# Altium integrated library Transformers.IntLib: 24 symbols (part 1 of 2)
Pins are listed as number, name and electrical type; pins without a type are passive.

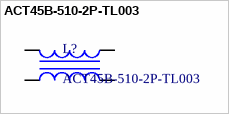
[diagram p0: symbol ACT45B-510-2P-TL003]

## ACT45B-510-2P-TL003
designator L?
Common-Mode Choke for CAN Bus System, 51uH, 50 V DC, -40 to 150 degC, 4-Pin SMD, RoHS, Tape and Reel
footprint TDK-ACT45B-510-2P-TL003-4_V (SMD, 4-Leads, Body 4.7x3.4mm, Pitch 2.5mm)
pins: 1, 2, 3, 4


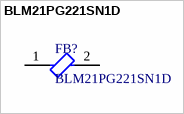
[diagram p1: symbol BLM21PG221SN1D]

## BLM21PG221SN1D
designator FB?
Chip Ferrite Bead, 0805, 220Ω @ 100MHz, 0.045Ω, 25%, 2A
footprint FP-BLM21-0_2-t0_85-e0_5-IPC_A
footprint FP-BLM21-0_2-t0_85-e0_5-IPC_B
footprint FP-BLM21-0_2-t0_85-e0_5-IPC_C
footprint FP-BLM21-0_2-t0_85-e0_5-MFG
pins: 1, 2


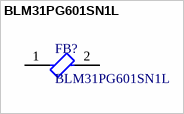
[diagram p2: symbol BLM31PG601SN1L]

## BLM31PG601SN1L
designator FB?
Chip Ferrite Bead Array, 1206, 600Ω @ 100MHz, 0.08Ω, 25%, 1.5A
footprint FP-BLM31-0_2-t1_1-IPC_A
footprint FP-BLM31-0_2-t1_1-IPC_B
footprint FP-BLM31-0_2-t1_1-IPC_C
footprint FP-BLM31-0_2-t1_1-MFG
pins: 1, 2


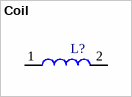
[diagram p3: symbol Coil]

## Coil
designator L?
footprint Coil_drosel
footprint 30A_10uH
footprint NR4030
footprint Coil_4.5x4.5_mm
footprint Coil-12x7x5(vert)
footprint Coil-12x7x5
pins: 1, 2


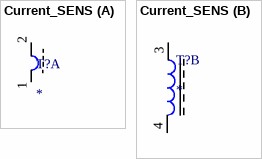
[diagram p4: symbol Current_SENS]

## Current_SENS
designator T?
footprint Current_SENS
footprint Current_Sense_13x7x5
footprint CURRENT_SENS_Case
part A pins: 1 3, 2 4
part B pins: 3, 4


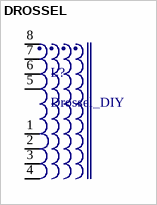
[diagram p5: symbol DROSSEL]

## DROSSEL
designator L?, comment Drossel_DIY
Drosel; PartNumber: 750311457; Manufacturer: Wuerth Elektronik; Ui: 36V; ComponentLink1Description: Manufacturer URL; ComponentLink2Description: Datasheet; ComponentLink1URL: http://www.we-online.com; PackageReference: EP13; ComponentLink2URL: http://katalog.we-online.de/pbs/datasheet/750311457.pdf
footprint Drossel
pins: 1, 2, 3, 4, 5, 6, 7, 8


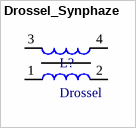
[diagram p6: symbol Drossel_Synphaze]

## Drossel_Synphaze
designator L?, comment Drossel
footprint Drossel_Synphaze
footprint T47x27x15
pins: 1, 2, 3, 4


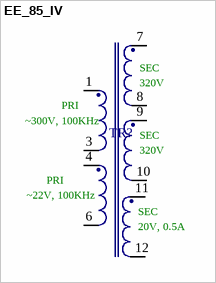
[diagram p7: symbol EE_85_IV]

## EE_85_IV
designator TR?, comment EE85  (value not drawn)
footprint EE85_Ferrite_Core
pins: 1, 3, 4, 6, 7, 8, 9, 10, 11, 12
text: SEC; 320V; PRI; ~300V, 100KHz; ~22V, 100KHz; 20V, 0.5A


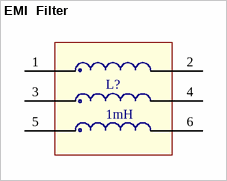
[diagram p8: symbol EMI  Filter]

## EMI  Filter
designator L?, comment 1mH
Three-Phase EMI Common Mode Filter Inductor 1mh-5mh
footprint 3PH_filter inductor 2mH 60A (High-current EMI EMC nanocrystalline amorphous three-phase common mode filter inductor 2mH 60A horizontal base plate)
pins: 1 0, 2 0, 3 0, 4 0, 5 0, 6 0


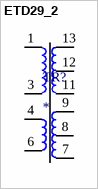
[diagram p9: symbol ETD29_2]

## ETD29_2
designator TR?
footprint TRANS_ETD_29
footprint ETD29_Transformer
footprint ETD29_Transformer_2
pins: 1, 3, 4, 6, 7, 8, 9, 11, 12, 13


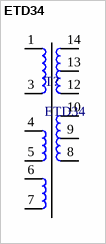
[diagram p10: symbol ETD34]

## ETD34
designator T?
footprint Transformer_ETD34
pins: 1, 3, 4, 5, 6, 7, 8, 9, 10, 12, 13, 14


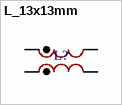
[diagram p11: symbol L_13x13mm]

## L_13x13mm
designator L?
footprint L_13x13mm
pins: 1, 2, 3, 4


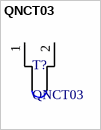
[diagram p12: symbol QNCT03]

## QNCT03
designator T?
High Precision Current Transformer QNCT03L  100A 25mA  4000:1
footprint QNCT03L (Current Transformer QNCT03L)
pins: 1 3, 2 4


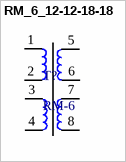
[diagram p13: symbol RM_6_12-12-18-18]

## RM_6_12-12-18-18
designator T?, comment RM-6
footprint TRANS_RM6
pins: 1, 2, 3, 4, 5, 6, 7, 8


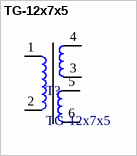
[diagram p14: symbol TG-12x7x5]

## TG-12x7x5
designator T?
footprint TG_12x7x5
pins: 1, 2, 3, 4, 5, 6


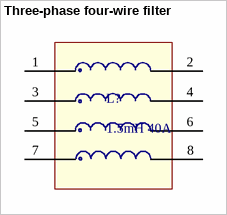
[diagram p15: symbol Three-phase four-wire filter]

## Three-phase four-wire filter
designator L?, comment 1.5mH 40A
Three-phase four-wire common mode inductor, high-power ferrite choke 1.5mH 40A, four-phase filter choke
footprint high-power ferrite choke 1.5mH 40A (Three-phase four-wire common mode inductor, high-power ferrite choke 1.5mH 40A, four-phase filter choke)
pins: 1 0, 2 0, 3 0, 4 0, 5 0, 6 0, 7 0, 8 0


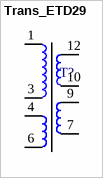
[diagram p16: symbol Trans_ETD29]

## Trans_ETD29
designator T?, comment ETD29  (value not drawn)
footprint TRANS_ETD_29
footprint ETD29_Transformer_2
pins: 1, 3, 4, 6, 7, 9, 10, 12


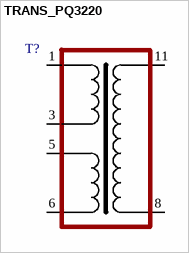
[diagram p17: symbol TRANS_PQ3220]

## TRANS_PQ3220
designator T?
footprint TRANS_PQ3220
pins: 1, 3, 5, 6, 8, 11


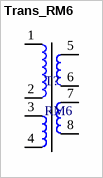
[diagram p18: symbol Trans_RM6]

## Trans_RM6
designator T?, comment RM6
footprint TRANS_RM6
pins: 1, 2, 3, 4, 5, 6, 7, 8


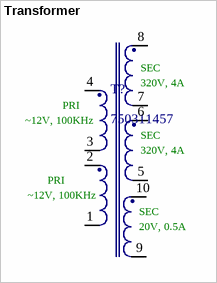
[diagram p19: symbol Transformer]

## Transformer
designator T?, comment 750311457
Transformer; Manufacturer: Wuerth Elektronik; Ui: 36V; ComponentLink1Description: Manufacturer URL; ComponentLink2Description: Datasheet; ComponentLink1URL: http://www.we-online.com; PartNumber: 750311457; PackageReference: EP13; ComponentLink2URL: http://katalog.we-online.de/pbs/datasheet/750311457.pdf
footprint Transformer
footprint EE85_Ferrite_Core
pins: 1, 2, 3, 4, 5, 6, 7, 8, 9, 10
text: SEC; 320V, 4A; PRI; ~12V, 100KHz; 20V, 0.5A


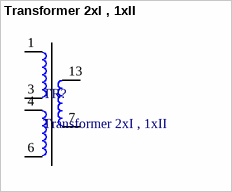
[diagram p20: symbol Transformer 2xI , 1xII]

## Transformer 2xI , 1xII
designator TR?
footprint TRANS_ETD_29
pins: 1, 3, 4, 6, 7, 13


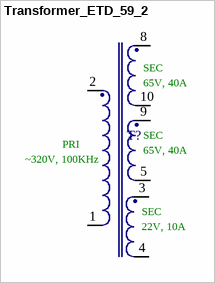
[diagram p21: symbol Transformer_ETD_59_2]

## Transformer_ETD_59_2
designator T?, comment ETD-59_2  (value not drawn)
footprint Transformer_ETD59_2
pins: 1, 2, 3, 4, 5, 8, 9, 10
text: SEC; 65V, 40A; PRI; ~320V, 100KHz; 22V, 10A


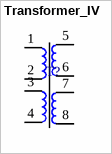
[diagram p22: symbol Transformer_IV]

## Transformer_IV
designator T?
footprint EE84AA Hor
pins: 1, 2, 3, 4, 5, 6, 7, 8
